# Altium schematic symbol library C2835315.SchLib: 1 symbol
Pins are listed as number, name and electrical type; pins without a type are passive.

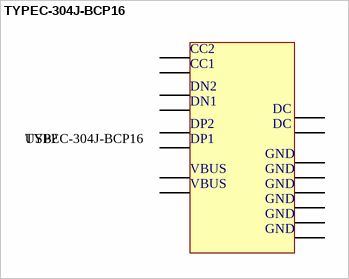
[diagram p0: symbol TYPEC-304J-BCP16]

## TYPEC-304J-BCP16
designator USB?
USB-C (USB TYPE-C) Receptacle Connector 16 Position Surface Mount, Right Angle; Name: C2835315; Source: LCSC
footprint USB-C-SMD_TYPEC-304J-BCP16 (USB-C (USB TYPE-C) Receptacle Connector 16 Position Surface Mount, Right Angle)
pins: 13 GND, 14 GND, 15 GND, 16 GND, A1B12 GND, A4B9 VBUS, A5 CC1, A6 DP1, A7 DN1, A8 SBU1, B1A12 GND, B4A9 VBUS, B5 CC2, B6 DP2, B7 DN2, B8 SBU2
text: DC